# Altium schematic symbol library TPS22975DSGR.SchLib: 1 symbol
Pins are listed as number, name and electrical type; pins without a type are passive.

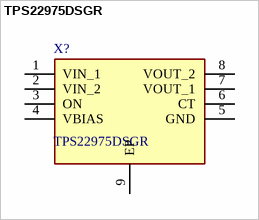
[diagram p0: symbol TPS22975DSGR]

## TPS22975DSGR
designator X?
5.7V, 6A, 16m Load Switch with Adjustable Rise Time & Optional QOD for Cost-Conscious Applications; Manufacturer_Name: Texas Instruments; Geometry.Height: 0.8mm; Manufacturer_Part_Number: TPS22975DSGR; Mouser Part Number: 595-TPS22975DSGR; Mouser Price/Stock: https://www.mouser.co.uk/ProductDetail/Texas-Instruments/TPS22975DSGR?qs=zEmsApcVOkXVZ0HZtWdfyQ%3D%3D; Arrow Part Number: TPS22975DSGR; Arrow Price/Stock: https://www.arrow.com/en/products/tps22975dsgr/texas-instruments?utm_currency=USD&region=nac; Datasheet Link: http://www.ti.com/lit/gpn/tps22975
footprint SON50P200X200X80-9N
pins: 1 VIN_1, 2 VIN_2, 3 ON, 4 VBIAS, 5 GND, 6 CT, 7 VOUT_1, 8 VOUT_2, 9 EP